# Altium footprint library 1776275-5.PcbLib: 1 footprints
Each footprint in its own frame and in the unit in brackets; x right, y up, seen from the top. Pads: shape width x height; smd on the part's side, far side on the other; paste and mask are expansions set on the pad; w line width, h text height; cw(c..) or ccw(c..) is an arc to the next point about the centre after c.
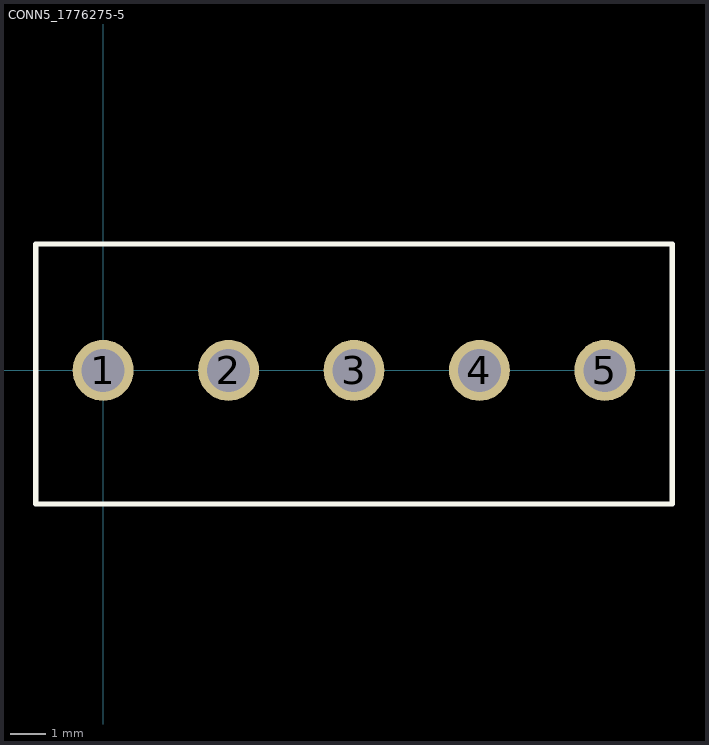
[diagram p0: the footprint, top view; thin cyan lines are the x and y axes]

## CONN5_1776275-5 [mil]
pads (5):
  round 67 / inner round 60 / far side round 67 hole 47 paste-99999 mask+0: 1(0,0) 2(137.8,0) 3(275.59,0) 4(413.39,0) 5(551.18,0)
Top Overlay:
  lines w6: -73.9,-146.73 -73.9,138.86 625.08,138.86 625.08,-146.73 -73.9,-146.73
3D body "c-1776275-5-a-3d.stp": height 326.77, standoff -165.35, extent -89.17,-135.59 639.17,140